# Altium footprint library FootPrintLib_0.PcbLib: 266 footprints (part 12 of 17)
Each footprint in its own frame and in the unit in brackets; x right, y up, seen from the top. Pads: shape width x height; smd on the part's side, far side on the other; paste and mask are expansions set on the pad; w line width, h text height; cw(c..) or ccw(c..) is an arc to the next point about the centre after c.
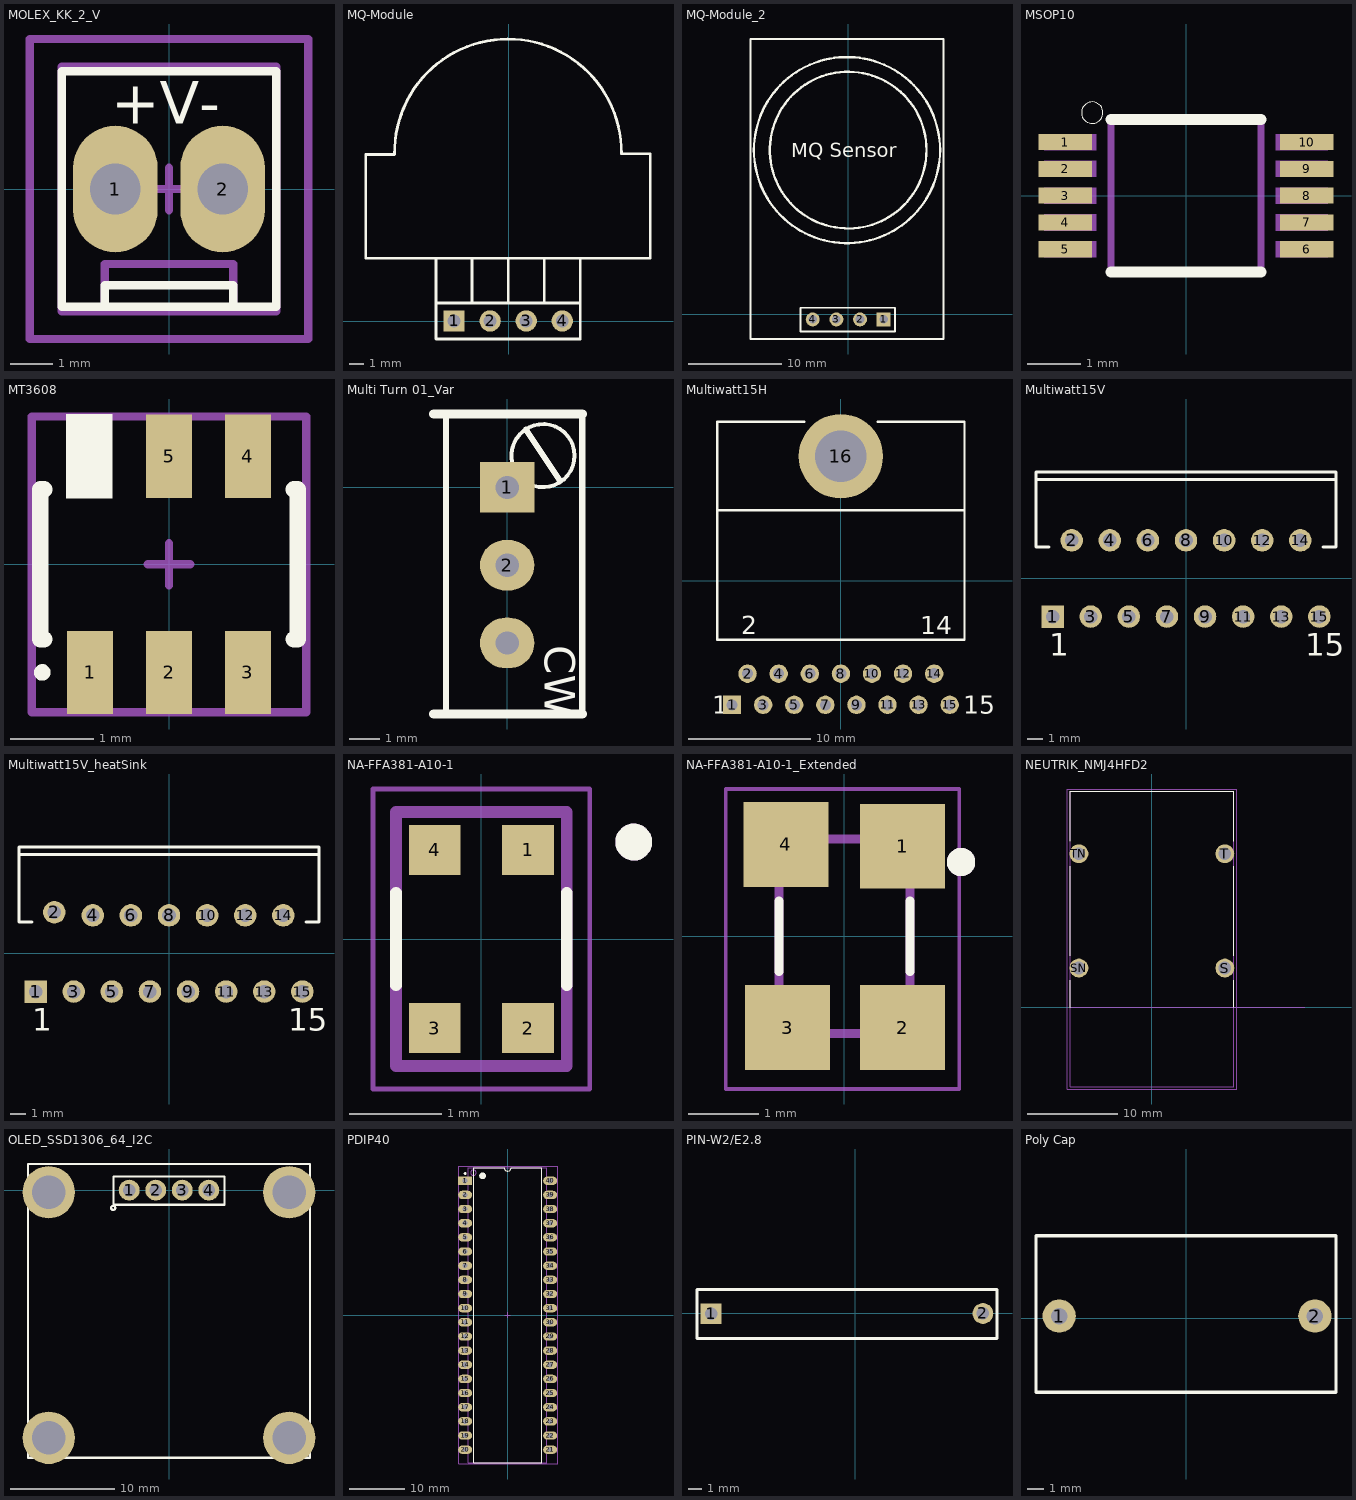
[diagram p11: the footprints below, top view; thin cyan lines are the x and y axes]

## MOLEX_KK_2_V [mm]
height 11.6
pads (2):
  oval 2x3 hole 1.2: 1(-1.27,0) 2(1.27,0)
Top Overlay:
  lines w0.2: -1.524,-2.794 -1.524,-2.286 1.524,-2.286 1.524,-2.794 ; -2.54,-2.794 2.54,-2.794 2.54,2.794 -2.54,2.794 -2.54,-2.794
  text "+V-" at -1.372,1.549 h1
Mechanical 13:
  lines w0.2: -1.524,-2.9 -1.524,-1.778 1.524,-1.778 1.524,-2.9 ; -2.54,-2.9 2.54,-2.9 2.54,2.9 -2.54,2.9 -2.54,-2.9
Mechanical 15:
  lines w0.2: -0.508,0 0.508,0 ; 0,-0.508 0,0.508 ; -3.302,-3.556 -1.016,-3.556 3.302,-3.556 3.302,-1.016 3.302,3.556 -3.302,3.556 -3.302,-3.556
3D body "MOLEX KK 022272021.STEP": height 11.7, standoff -3.56, extent -2.54,-2.9 2.54,2.9

## MQ-Module [mil]
pads (4):
  rect 59.06x59.06 hole 36: 1(-152,1)
  round 59.06 hole 36: 2(-52,1) 3(48,1) 4(148,1)
Top Overlay:
  lines w7.87: -397,462.4 -397,175 -205,175 195,175 ; -396,463 -317.26,463 ; -317,463 cw(c-2.51,468.58) 312,465 ; -202,50 -201,50 ; -201.95,47.87 -201.95,172.87 ; -101.96,55 -101.96,173.81 ; -1.97,55 -1.97,174.81 ; 98.01,51 98.01,174.81 ; 194,175 391,175 ; 197,51 -202,51 -202,-49 198,-49 198,51 ; 198,50 198,175 ; 313,465 391.74,465 ; 392,177 392,464.4
3D body "MQ2 Gas Sensor.SLDPRT": height 1299.21, standoff -127.95, extent -395.67,-46 395.67,800.46

## MQ-Module_2 [mm]
pads (4):
  rect 1.5x1.5 hole 0.914: 1(3.81,-0.533)
  round 1.5 hole 0.914: 2(1.27,-0.533) 3(-1.27,-0.533) 4(-3.81,-0.533)
Top Overlay:
  circle w0.254: c-0.127,17.653 r10
  circle w0.254: c0,17.653 r8.418
  lines w0.2: -5.131,0.686 -5.105,0.686 ; 5.004,0.711 -5.131,0.711 -5.131,-1.829 5.029,-1.829 5.029,0.711
  lines w0.25: -10.465,29.566 -10.49,29.566 -10.49,-2.642 10.236,-2.642 10.236,29.591 -10.465,29.591
  text "MQ Sensor" at -6.096,16.891 h1.52
3D body "MQ-2.step": height 23.74, standoff 2.38, extent -10.401,-2.54 10.249,29.71
3D body "61300411121.stp": height 10.27, standoff -1.27, extent -5.158,-1.946 5.002,0.594

## MSOP10 [mm]
pads (10):
  rect 1x0.3 smd paste-1 mask+0: 1(-2.25,1) 2(-2.25,0.5) 3(-2.25,0) 4(-2.25,-0.5) 5(-2.25,-1) 6(2.25,-1) 7(2.25,-0.5) 8(2.25,0) 9(2.25,0.5) 10(2.25,1)
Top Overlay:
  circle w0: c-1.75,1.55 r0.2
  lines w0.203: -1.4,-1.425 1.4,-1.425 ; -1.4,1.425 1.4,1.425
Top Paste:
  region: -1.825,0.875 -2.7,0.875 -2.7,1.125 -1.825,1.125
  region: -1.825,0.375 -2.7,0.375 -2.7,0.625 -1.825,0.625
  region: -1.825,-0.125 -2.7,-0.125 -2.7,0.125 -1.825,0.125
  region: -1.825,-0.625 -2.7,-0.625 -2.7,-0.375 -1.825,-0.375
  region: -1.825,-1.125 -2.7,-1.125 -2.7,-0.875 -1.825,-0.875
  region: 2.7,-1.125 1.825,-1.125 1.825,-0.875 2.7,-0.875
  region: 2.7,-0.625 1.825,-0.625 1.825,-0.375 2.7,-0.375
  region: 2.7,-0.125 1.825,-0.125 1.825,0.125 2.7,0.125
  region: 2.7,0.375 1.825,0.375 1.825,0.625 2.7,0.625
  region: 2.7,0.875 1.825,0.875 1.825,1.125 2.7,1.125
Top Solder:
  region: -1.7,0.8 -2.8,0.8 -2.8,1.2 -1.7,1.2
  region: -1.7,0.3 -2.8,0.3 -2.8,0.7 -1.7,0.7
  region: -1.7,-0.2 -2.8,-0.2 -2.8,0.2 -1.7,0.2
  region: -1.7,-0.7 -2.8,-0.7 -2.8,-0.3 -1.7,-0.3
  region: -1.7,-1.2 -2.8,-1.2 -2.8,-0.8 -1.7,-0.8
  region: 2.8,-1.2 1.7,-1.2 1.7,-0.8 2.8,-0.8
  region: 2.8,-0.7 1.7,-0.7 1.7,-0.3 2.8,-0.3
  region: 2.8,-0.2 1.7,-0.2 1.7,0.2 2.8,0.2
  region: 2.8,0.3 1.7,0.3 1.7,0.7 2.8,0.7
  region: 2.8,0.8 1.7,0.8 1.7,1.2 2.8,1.2
Mechanical 13:
  region: -1.675,0.85 -2.65,0.85 -2.65,1.15 -1.675,1.15
  region: -1.675,0.35 -2.65,0.35 -2.65,0.65 -1.675,0.65
  region: -1.675,-0.15 -2.65,-0.15 -2.65,0.15 -1.675,0.15
  region: -1.675,-0.65 -2.65,-0.65 -2.65,-0.35 -1.675,-0.35
  region: -1.675,-1.15 -2.65,-1.15 -2.65,-0.85 -1.675,-0.85
  region: 2.65,-1.15 1.675,-1.15 1.675,-0.85 2.65,-0.85
  region: 2.65,-0.65 1.675,-0.65 1.675,-0.35 2.65,-0.35
  region: 2.65,-0.15 1.675,-0.15 1.675,0.15 2.65,0.15
  region: 2.65,0.35 1.675,0.35 1.675,0.65 2.65,0.65
  region: 2.65,0.85 1.675,0.85 1.675,1.15 2.65,1.15
  lines w0.127: -1.4,-1.425 -1.4,1.425 ; 1.4,-1.425 1.4,1.425
3D body "step_temp.STEP": height 1, standoff 0, extent -2.45,-1.5 2.45,1.5

## MT3608 [mm] "SOT-457/SC-74; 6 Leads; Body 3 x 3 mm, inc. leads (LxW max)"
height 1.45
pads (5):
  rect 0.55x1 smd: 1(-0.95,-1.3) 2(0,-1.3) 3(0.95,-1.3) 4(0.95,1.3) 5(0,1.3)
Top Overlay:
  circle w0.1: c-1.525,-1.3 r0.05
  rectangle: -1.238,0.793 -0.679,1.809
  lines w0.2: -1.5,-0.9 -1.55,-0.9 -1.55,0.9 -1.5,0.9 ; 1.5,-0.9 1.55,-0.9 1.55,0.9 1.5,0.9
Mechanical 15:
  lines w0.1: -0.254,0 0.254,0 ; 0,-0.254 0,0.254 ; -1.651,-1.778 -1.651,1.778 1.651,1.778 1.651,-1.778 -1.651,-1.778
3D body "User Library-SOT23-6.step": height 1.45, standoff 0, extent -1.448,-1.4 1.452,1.4

## Multi Turn 01_Var [mil] "Stand Multi Turn - Turning CW Increase P1~2 Resistor"
height 472.44
pads (3):
  rect 70x65 hole 30: 1(0,0)
  oval 70x65 hole 30: 2(0,-100) ""(0,-200)
Top Overlay:
  circle w5: c46.03,40.94 r40.58
  lines w7.87: -78.74,-291.34 -78.74,94.49 ; 24.02,74.41 67.72,8.66 ; 96.46,-291.34 96.46,94.49
  lines w11.81: -94.49,-291.34 96.46,-291.34 ; -94.49,94.49 96.46,94.49
  text "CW" at 48,-203 h39.37
3D body "multiturn.STEP": height 452.18, standoff -75.38, extent -73.75,-282.01 92,92.01

## Multiwatt15H [mm] "TO, Thru-Hole, Horizontal, Heatsink Mounted; 15 Bent Staggered Leads; Pitch 1.27 mm"
height 5
pads (16):
  rect 1.5x1.5 hole 0.9: 1(-8.89,-10.155)
  round 1.5 hole 0.9: 2(-7.62,-7.615) 3(-6.35,-10.155) 4(-5.08,-7.615) 5(-3.81,-10.155) 6(-2.54,-7.615) 7(-1.27,-10.155) 8(0,-7.615) 9(1.27,-10.155) 10(2.54,-7.615) 11(3.81,-10.155) 12(5.08,-7.615) 13(6.35,-10.155) 14(7.62,-7.615) 15(8.89,-10.155)
  round 6.9 hole 4.2: 16(0,10.155)
Top Overlay:
  lines w0.2: -10.1,5.755 10.1,5.755 ; -3,12.955 -10.1,12.955 -10.1,-4.845 10.1,-4.845 10.1,12.955 3,12.955
  text "1" at -10.515,-10.905 h1.5
  text "15" at 10.015,-10.905 h1.5
  text "14" at 6.495,-4.37 h1.5
  text "2" at -8.12,-4.37 h1.5
3D body "L298HN_MODEL.STEP": height 5.1, standoff -5.18, extent -9.975,-10.643 9.925,12.702

## Multiwatt15V [mm] "TO, Thru-Hole, Vertical, Heatsink Mounted; 15 Bent Staggered Leads; Pitch 1.27 mm"
height 21
pads (15):
  rect 1.5x1.5 hole 0.9: 1(-8.89,-2.54)
  round 1.5 hole 0.9: 2(-7.62,2.54) 3(-6.35,-2.54) 4(-5.08,2.54) 5(-3.81,-2.54) 6(-2.54,2.54) 7(-1.27,-2.54) 8(0,2.54) 9(1.27,-2.54) 10(2.54,2.54) 11(3.81,-2.54) 12(5.08,2.54) 13(6.35,-2.54) 14(7.62,2.54) 15(8.89,-2.54)
Top Overlay:
  lines w0.2: -10,6.59 10,6.59 ; -9.144,2.09 -10,2.09 -10,7.09 10,7.09 10,2.09 9.144,2.09
  text "1" at -9.12,-5.165 h1.5
  text "15" at 7.94,-5.165 h1.5
3D body "L298N_axisY.step": height 21.25, standoff -3.3, extent -9.698,-2.961 9.902,5.639

## Multiwatt15V_heatSink [mm] "TO, Thru-Hole, Vertical, Heatsink Mounted; 15 Bent Staggered Leads; Pitch 1.27 mm"
height 21
pads (15):
  rect 1.5x1.5 hole 0.9: 1(-8.89,-2.54)
  round 1.5 hole 0.9: 2(-7.645,2.743) 3(-6.35,-2.54) 4(-5.08,2.54) 5(-3.81,-2.54) 6(-2.54,2.54) 7(-1.27,-2.54) 8(0,2.54) 9(1.27,-2.54) 10(2.54,2.54) 11(3.81,-2.54) 12(5.08,2.54) 13(6.35,-2.54) 14(7.62,2.54) 15(8.89,-2.54)
Top Overlay:
  lines w0.2: -10,6.59 10,6.59 ; -9.144,2.09 -10,2.09 -10,7.09 10,7.09 10,2.09 9.144,2.09
  text "1" at -9.12,-5.165 h1.5
  text "15" at 7.94,-5.165 h1.5
3D body "L298N_Heatsink_axisY.step": height 25.7, standoff -3.3, extent -11.506,-2.846 11.494,14.174

## NA-FFA381-A10-1 [mm]
pads (4):
  rect 0.56x0.54 smd paste+0 mask+0.102: 1(0.505,0.965) 2(0.505,-0.965) 3(-0.505,-0.965) 4(-0.505,0.965)
Top Overlay:
  circle w0.2: c1.65,1.05 r0.1
  lines w0.127: -0.925,-0.5 -0.925,0.5 ; 0.925,-0.5 0.925,0.5
Mechanical 13:
  circle w0.2: c1.65,1.05 r0.1
  lines w0.127: -0.925,-1.375 -0.925,1.375 0.925,1.375 0.925,-1.375 -0.925,-1.375
Mechanical 15:
  lines w0.05: -1.175,-1.625 -1.175,1.625 1.175,1.625 1.175,-1.625 -1.175,-1.625
3D body "step_temp.STEP": height 0.95, standoff 0, extent -0.925,-1.375 0.925,1.375

## NA-FFA381-A10-1_Extended [mm]
pads (4):
  rect 1.2x1.2 smd paste+0 mask+0.102: 1(0.823,1.273) 2(0.823,-1.292) 3(-0.802,-1.292) 4(-0.828,1.299)
Top Overlay:
  circle w0.2: c1.65,1.05 r0.1
  lines w0.127: -0.925,-0.5 -0.925,0.5 ; 0.925,-0.5 0.925,0.5
Mechanical 13:
  circle w0.2: c1.65,1.05 r0.1
  lines w0.127: -0.925,-1.375 0.925,-1.375 0.925,1.375 -0.925,1.375 -0.925,-1.375
Mechanical 15:
  lines w0.05: -1.676,-2.159 1.626,-2.159 1.626,2.083 -1.676,2.083 -1.676,-2.159
3D body "step_temp.STEP": height 0.95, standoff 0, extent -0.925,-1.375 0.925,1.375

## NEUTRIK_NMJ4HFD2 [mm]
height 15.84
pads (4):
  round 2.1 hole 1.4: S(8.115,4.35) SN(-8.115,4.35) T(8.115,17.05) TN(-8.115,17.05)
Top Overlay:
  lines w0.127: -9.1,0 -9.1,2.98 ; -9.1,5.72 -9.1,15.68 ; -9.1,18.42 -9.1,24 9.1,24 9.1,18.42 ; 9.1,0 9.1,2.98 ; 9.1,5.72 9.1,15.68
Mechanical 13:
  lines w0.127: 17,0 -9.1,0 ; -9.1,0 -9.1,-8.85 9.1,-8.85 9.1,0 9.1,24 -9.1,24 -9.1,0
  text "PCB EDGE" at 9.5,0.25 h1.02
Mechanical 15:
  lines w0.05: -9.415,-9.1 -9.415,24.25 9.415,24.25 9.415,-9.1 -9.415,-9.1
3D body "step_temp.STEP": height 17.01, standoff -4, extent -9.1,-8.825 9.1,24.025

## OLED_SSD1306_64_I2C [mm] "OLED SS1306 Breakout, 128X64, I2C"
height 10
pads (8):
  round 2 hole 1.2 mask+0.1: 1(-3.81,0) 2(-1.27,0) 3(1.27,0) 4(3.81,0)
  round 5 hole 3.2: ""(-11.5,-23.7) ""(-11.5,-0.2) ""(11.5,-23.7) ""(11.5,-0.2)
Top Overlay:
  circle w0.2: c-5.34,-1.7 r0.2
  lines w0.2: -13.5,-25.6 13.5,-25.6 13.5,2.5 -13.5,2.5 -13.5,-25.6 ; -5.3,-1.4 -5.3,1.3 5.3,1.3 5.3,-1.4 -5.3,-1.4
3D body "User Library-128x64I2COLEDDisplayAdafruit_SSD1306.step": height 13.97, standoff 3.13, extent -13.35,-25.5 13.35,2.36
3D body "female_header_a-bl254-eg-g02d.stp": height 8.5, standoff -3.2, extent -5.205,-1.3 0.125,1.2
3D body "female_header_a-bl254-eg-g02d.stp": height 8.5, standoff -3.2, extent -0.125,-1.3 5.205,1.2

## PDIP40 [mm] "DIP, 40-Leads, Row Spacing 15.24mm, Pitch 2.54mm, Body 52.2x13.95mm"
height 4.83
pads (40):
  rect 2.5x1.5 hole 0.9: 1(-7.62,24.13)
  oval 2.5x1.5 hole 0.9: 2(-7.62,21.59) 3(-7.62,19.05) 4(-7.62,16.51) 5(-7.62,13.97) 6(-7.62,11.43) 7(-7.62,8.89) 8(-7.62,6.35) 9(-7.62,3.81) 10(-7.62,1.27) 11(-7.62,-1.27) 12(-7.62,-3.81) 13(-7.62,-6.35) 14(-7.62,-8.89) 15(-7.62,-11.43) 16(-7.62,-13.97) 17(-7.62,-16.51) 18(-7.62,-19.05) 19(-7.62,-21.59) 20(-7.62,-24.13) 21(7.62,-24.13) 22(7.62,-21.59) 23(7.62,-19.05) 24(7.62,-16.51) 25(7.62,-13.97) 26(7.62,-11.43) 27(7.62,-8.89) 28(7.62,-6.35) 29(7.62,-3.81) 30(7.62,-1.27) 31(7.62,1.27) 32(7.62,3.81) 33(7.62,6.35) 34(7.62,8.89) 35(7.62,11.43) 36(7.62,13.97) 37(7.62,16.51) 38(7.62,19.05) 39(7.62,21.59) 40(7.62,24.13)
Top Overlay:
  circle w0.6: c-4.5,25 r0.3
  circle w0.25: c-7.62,25.43 r0.125
  lines w0.2: -6.1,-26.5 6.1,-26.5 6.1,26.5 0.635,26.5 cw(c0,26.5) -0.635,26.5 -6.1,26.5 -6.1,-26.5
Mechanical 13:
  circle w0.1: c-6.15,25.575 r0.5
  lines w0.1: -7.05,-26.475 7.05,-26.475 7.05,26.475 -7.05,26.475 -7.05,-26.475
Mechanical 15:
  lines w0.1: -0.5,0 0.5,0 ; 0,-0.5 0,0.5
  lines w0.15: -8.8,-26.7 -8.8,26.7 9,26.7 9,-26.7 -8.8,-26.7
3D body "User Library-DIP40-600-with-chip-Type2.STEP": height 7.89, standoff -3.27, extent -8.7,-26.13 8.9,26.13

## PIN-W2/E2.8 [mm] "Thru-Hole; 2 Leads"
pads (2):
  rect 1.5x1.5 hole 0.9: 1(-10.389,-0.025)
  round 1.5 hole 0.9: 2(9.195,0)
Top Overlay:
  lines w0.2: -11.405,-1.803 10.211,-1.803 10.211,1.727 -11.405,1.727 -11.405,-1.803
3D body "User Library-THERMAL FUSE, 102C, 5A, UCHIHASHI 221R.step": height 2.57, standoff -10.6, extent -11.244,-1.702 10.076,1.598

## Poly Cap [mm] "Polypropylene, 18'mm, Capacitor Class X2"
pads (2):
  round 2 hole 1: 1(-7.62,0.127) 2(7.747,0.127)
Top Overlay:
  lines w0.203: -9.017,-4.445 -9.017,4.953 9.017,4.953 9.017,-4.445 -9.017,-4.445
3D body "User Library-MKT(15_17x18x7).step": height 13.6, standoff -1.9, extent -8.974,-3.434 9.026,3.576